# Altium footprint library STM32G491CET6.PcbLib: 1 footprints
Each footprint in its own frame and in the unit in brackets; x right, y up, seen from the top. Pads: shape width x height; smd on the part's side, far side on the other; paste and mask are expansions set on the pad; w line width, h text height; cw(c..) or ccw(c..) is an arc to the next point about the centre after c.
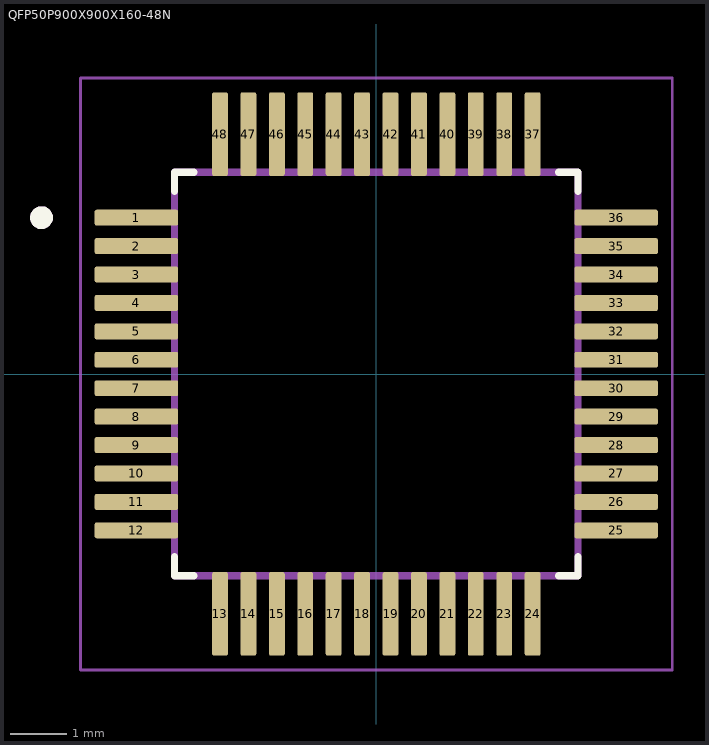
[diagram p0: the footprint, top view; thin cyan lines are the x and y axes]

## QFP50P900X900X160-48N [mm]
pads (48):
  rrect25% 1.47x0.28 smd paste+0 mask+0.102: 1(-4.22,2.75) 2(-4.22,2.25) 3(-4.22,1.75) 4(-4.22,1.25) 5(-4.22,0.75) 6(-4.22,0.25) 7(-4.22,-0.25) 8(-4.22,-0.75) 9(-4.22,-1.25) 10(-4.22,-1.75) 11(-4.22,-2.25) 12(-4.22,-2.75) 25(4.22,-2.75) 26(4.22,-2.25) 27(4.22,-1.75) 28(4.22,-1.25) 29(4.22,-0.75) 30(4.22,-0.25) 31(4.22,0.25) 32(4.22,0.75) 33(4.22,1.25) 34(4.22,1.75) 35(4.22,2.25) 36(4.22,2.75)
  rrect25% 0.28x1.47 smd paste+0 mask+0.102: 13(-2.75,-4.22) 14(-2.25,-4.22) 15(-1.75,-4.22) 16(-1.25,-4.22) 17(-0.75,-4.22) 18(-0.25,-4.22) 19(0.25,-4.22) 20(0.75,-4.22) 21(1.25,-4.22) 22(1.75,-4.22) 23(2.25,-4.22) 24(2.75,-4.22) 37(2.75,4.22) 38(2.25,4.22) 39(1.75,4.22) 40(1.25,4.22) 41(0.75,4.22) 42(0.25,4.22) 43(-0.25,4.22) 44(-0.75,4.22) 45(-1.25,4.22) 46(-1.75,4.22) 47(-2.25,4.22) 48(-2.75,4.22)
Top Overlay:
  circle w0.2: c-5.89,2.75 r0.1
  lines w0.127: -3.55,-3.21 -3.55,-3.55 -3.21,-3.55 ; -3.55,3.21 -3.55,3.55 -3.21,3.55 ; 3.21,-3.55 3.55,-3.55 3.55,-3.21 ; 3.21,3.55 3.55,3.55 3.55,3.21
  text ".DESIGNATOR" at -5.126,5.349 h1
Assembly Top:
  circle w0.2: c-5.89,2.75 r0.1
  lines w0.127: -3.55,-3.55 3.55,-3.55 3.55,3.55 -3.55,3.55 -3.55,-3.55
Courtyard Top:
  lines w0.05: -5.205,-5.205 5.205,-5.205 5.205,5.205 -5.205,5.205 -5.205,-5.205
3D body "step_temp.STEP": height 1.54, standoff -0.06, extent -4.5,-4.5 4.5,4.5